# Altium footprint library SamacSys.PcbLib: 1008 footprints (part 15 of 63)
Each footprint in its own frame and in the unit in brackets; x right, y up, seen from the top. Pads: shape width x height; smd on the part's side, far side on the other; paste and mask are expansions set on the pad; w line width, h text height; cw(c..) or ccw(c..) is an arc to the next point about the centre after c.
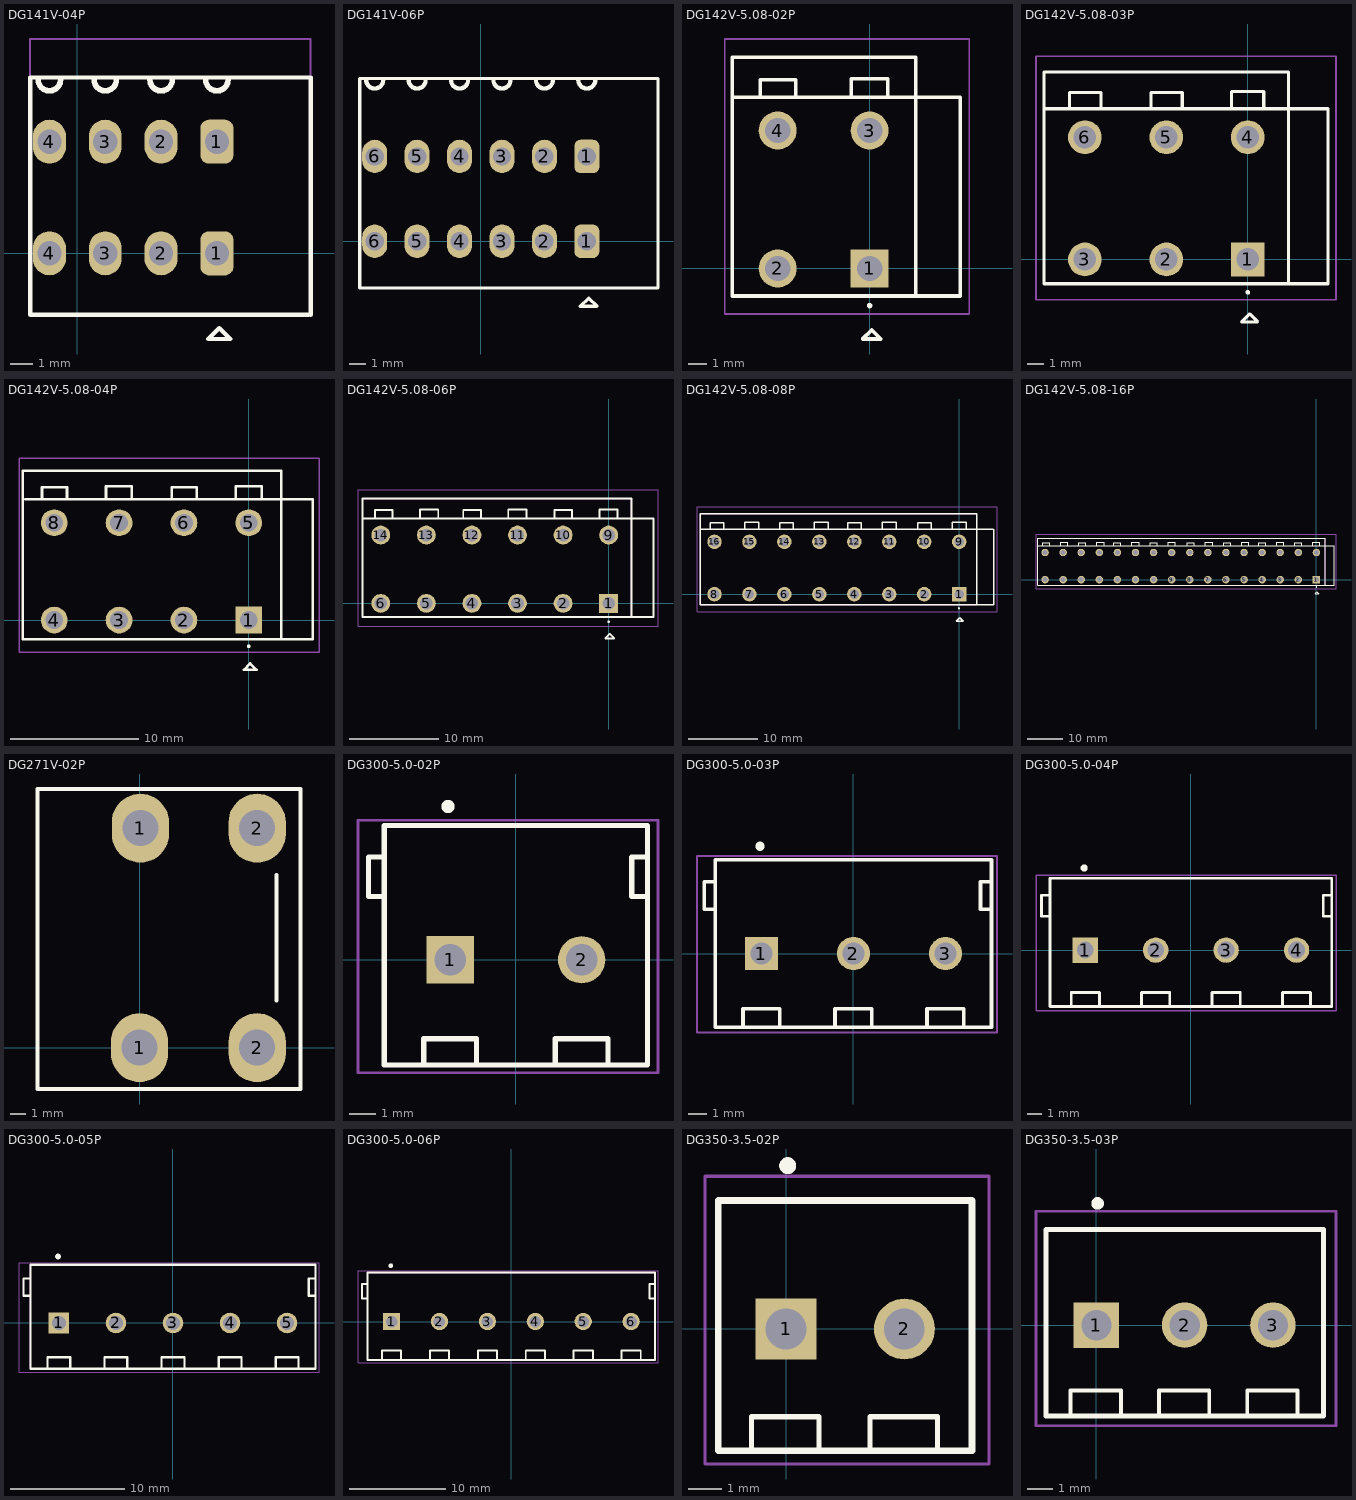
[diagram p14: the footprints below, top view; thin cyan lines are the x and y axes]

## DG141V-04P [mm]
height 14
pads (8):
  rrect50% 1.5x2 hole 1.1: 1(6.35,0) 1(6.35,5.08)
  oval 1.5x2 hole 1.1: 2(3.81,0) 2(3.81,5.08) 3(1.27,0) 3(1.27,5.08) 4(-1.27,0) 4(-1.27,5.08)
Top Overlay:
  lines w0.2: 10.529,-2.8 -2.15,-2.8 -2.15,8 10.61,8 10.61,-2.8 ; 5.96,-3.897 6.96,-3.897 6.46,-3.397 5.96,-3.897
  lines w0.254: -1.778,7.9 ccw(c-1.27,7.9) -0.762,7.9 ; 0.762,7.9 ccw(c1.27,7.9) 1.778,7.9 ; 3.302,7.9 ccw(c3.81,7.9) 4.318,7.9 ; 5.842,7.9 ccw(c6.35,7.9) 6.858,7.9
Countryard:
  lines w0.1: 10.529,-2.8 -2.15,-2.8 -2.15,9.751 10.61,9.751 10.61,-2.8
3D body "DG141V-2.54-04P-1Y-00A(H).stp": height 13.6, standoff -3.5, extent -2.2,-2.8 10.5,9.8

## DG141V-06P [mm]
height 14
pads (12):
  rrect50% 1.5x2 hole 1.1: 1(6.35,0) 1(6.35,5.08)
  oval 1.5x2 hole 1.1: 2(3.81,0) 2(3.81,5.08) 3(1.27,0) 3(1.27,5.08) 4(-1.27,0) 4(-1.27,5.08) 5(-3.81,0) 5(-3.81,5.08) 6(-6.35,0) 6(-6.35,5.08)
Top Overlay:
  lines w0.2: 10.529,-2.8 -7.25,-2.8 -7.25,9.751 10.61,9.751 10.61,-2.8 ; 5.96,-3.897 6.46,-3.397 6.96,-3.897 5.96,-3.897
  lines w0.254: -6.858,9.652 ccw(c-6.35,9.652) -5.842,9.652 ; -4.318,9.652 ccw(c-3.81,9.652) -3.302,9.652 ; -1.778,9.652 ccw(c-1.27,9.652) -0.762,9.652 ; 0.762,9.652 ccw(c1.27,9.652) 1.778,9.652 ; 3.302,9.652 ccw(c3.81,9.652) 4.318,9.652 ; 5.842,9.652 ccw(c6.35,9.652) 6.858,9.652
Countryard:
  lines w0.1: 10.529,-2.8 -7.25,-2.8 -7.25,9.751 10.61,9.751 10.61,-2.8
3D body "DG141V-2.54-06P-1Y-00A(H).stp": height 13.6, standoff -3.5, extent -7.239,-2.744 10.541,9.856

## DG142V-5.08-02P [mm]
pads (4):
  rect 2.1x2.1 hole 1.4: 1(0,0)
  round 2.1 hole 1.4: 2(-5.08,0) 3(0,7.62) 4(-5.08,7.62)
Top Overlay:
  lines w0.2: -7.6,9.455 4.955,9.455 ; -6.04,9.455 -6.04,10.418 -4.082,10.418 -4.082,9.455 ; -1.025,9.482 -1.025,10.475 1,10.475 1,9.464 ; 5,9.455 5,-1.52 2.54,-1.52 ; 0,-2.1 cw(c0,-2.05) 0,-2 ; 0,-2.1 ccw(c0,-2.05) 0,-2 ; 0,-2.1 cw(c0,-2.05) 0,-2 ; 2.54,-1.52 2.54,11.68 -7.6,11.68 -7.6,-1.52 2.54,-1.52 ; -0.39,-3.897 0.11,-3.397 0.61,-3.897 -0.39,-3.897
Assembly:
  lines w0.1: -7.62,-1.52 2.54,-1.52 2.54,11.68 -7.62,11.68 -7.62,-1.52
Countryard:
  lines w0.1: -8,-2.52 -8,12.68 5.5,12.68 5.5,-2.52 -8,-2.52
3D body "DG142V-5.08-02P-1Y-1000A(H).stp": height 14.17, standoff -3.43, extent -7.62,-1.462 5.24,11.938

## DG142V-5.08-03P [mm]
pads (6):
  rect 2.1x2.1 hole 1.4: 1(0,0)
  round 2.1 hole 1.4: 2(-5.08,0) 3(-10.16,0) 4(0,7.62) 5(-5.08,7.62) 6(-10.16,7.62)
Top Overlay:
  lines w0.2: -12.7,9.398 5,9.398 5,-1.52 2.54,-1.52 ; -11.12,9.455 -11.12,10.418 -9.162,10.418 -9.162,9.455 ; -6.04,9.455 -6.04,10.418 -4.082,10.418 -4.082,9.455 ; -1.025,9.482 -1.025,10.475 1,10.475 1,9.464 ; 0,-2.1 cw(c0,-2.05) 0,-2 ; 0,-2.1 ccw(c0,-2.05) 0,-2 ; 0,-2.1 cw(c0,-2.05) 0,-2 ; 2.54,-1.52 -12.7,-1.52 -12.7,11.68 2.54,11.68 2.54,-1.52 ; -0.39,-3.897 0.61,-3.897 0.11,-3.397 -0.39,-3.897
Assembly:
  lines w0.1: -12.7,-1.52 -12.7,11.68 2.54,11.68 2.54,-1.52 -12.7,-1.52
Countryard:
  lines w0.1: -13.208,-2.52 5.5,-2.52 5.5,12.68 -13.208,12.68 -13.208,-2.52
3D body "DG142V-5.08-02P-1Y-1000A(H).stp": height 14.17, standoff -3.43, extent -7.62,-1.462 5.24,11.938
3D body "DG142V-5.08-02P-1Y-1000A(H).stp": height 14.17, standoff -3.43, extent -12.7,-1.462 0.16,11.938

## DG142V-5.08-04P [mm]
pads (8):
  rect 2.1x2.1 hole 1.4: 1(0,0)
  round 2.1 hole 1.4: 2(-5.08,0) 3(-10.16,0) 4(-15.24,0) 5(0,7.62) 6(-5.08,7.62) 7(-10.16,7.62) 8(-15.24,7.62)
Top Overlay:
  lines w0.2: -17.5,9.455 4.955,9.455 ; -16.2,9.455 -16.2,10.418 -14.242,10.418 -14.242,9.455 ; -11.185,9.482 -11.185,10.475 -9.16,10.475 -9.16,9.464 ; -6.04,9.455 -6.04,10.418 -4.082,10.418 -4.082,9.455 ; -1.025,9.482 -1.025,10.475 1,10.475 1,9.464 ; 5,9.455 5,-1.52 2.54,-1.52 ; 0,-2.1 cw(c0,-2.05) 0,-2 ; 0,-2.1 ccw(c0,-2.05) 0,-2 ; 0,-2.1 cw(c0,-2.05) 0,-2 ; 2.54,-1.52 2.54,11.68 -17.7,11.68 -17.7,-1.52 2.54,-1.52 ; -0.39,-3.897 0.11,-3.397 0.61,-3.897 -0.39,-3.897
Assembly:
  lines w0.1: -17.7,-1.52 2.54,-1.52 2.54,11.68 -17.7,11.68 -17.7,-1.52
Countryard:
  lines w0.1: -18,-2.52 -18,12.68 5.5,12.68 5.5,-2.52 -18,-2.52
3D body "DG142V-5.08-04P-1Y-1000A(H).stp": height 14.17, standoff -3.43, extent -17.78,-1.462 5.24,11.938

## DG142V-5.08-06P [mm]
pads (12):
  rect 2.1x2.1 hole 1.4: 1(0,0)
  round 2.1 hole 1.4: 2(-5.08,0) 3(-10.16,0) 4(-15.24,0) 5(-20.32,0) 6(-25.4,0) 9(0,7.62) 10(-5.08,7.62) 11(-10.16,7.62) 12(-15.24,7.62) 13(-20.32,7.62) 14(-25.4,7.62)
Top Overlay:
  lines w0.2: -27.44,9.455 -15.045,9.455 ; -26.04,9.455 -26.04,10.418 -24.082,10.418 -24.082,9.455 ; -21.025,9.482 -21.025,10.475 -19,10.475 -19,9.464 ; -17.5,9.455 4.955,9.455 ; -16.2,9.455 -16.2,10.418 -14.242,10.418 -14.242,9.455 ; -11.185,9.482 -11.185,10.475 -9.16,10.475 -9.16,9.464 ; -6.04,9.455 -6.04,10.418 -4.082,10.418 -4.082,9.455 ; -1.025,9.482 -1.025,10.475 1,10.475 1,9.464 ; 5,9.455 5,-1.52 2.54,-1.52 ; 0,-2.1 cw(c0,-2.05) 0,-2 ; 0,-2.1 ccw(c0,-2.05) 0,-2 ; 0,-2.1 cw(c0,-2.05) 0,-2 ; 2.54,-1.52 -27.44,-1.52 -27.44,11.68 2.54,11.68 2.54,-1.52 ; -0.39,-3.897 0.11,-3.397 0.61,-3.897 -0.39,-3.897
Assembly:
  lines w0.1: -27.44,-1.52 2.54,-1.52 2.54,11.68 -27.44,11.68
Countryard:
  lines w0.1: -27.94,-2.52 -27.94,12.68 5.5,12.68 5.5,-2.52 -27.94,-2.52
3D body "DG142V-5.0-06P-1Y-00A&Z(H).stp": height 14.1, standoff -3.5, extent -27.87,-1.4 4.67,12.1

## DG142V-5.08-08P [mm]
pads (16):
  rect 2.1x2.1 hole 1.4: 1(0,0)
  round 2.1 hole 1.4: 2(-5.08,0) 3(-10.16,0) 4(-15.24,0) 5(-20.32,0) 6(-25.4,0) 7(-30.48,0) 8(-35.56,0) 9(0,7.62) 10(-5.08,7.62) 11(-10.16,7.62) 12(-15.24,7.62) 13(-20.32,7.62) 14(-25.4,7.62) 15(-30.48,7.62) 16(-35.56,7.62)
Top Overlay:
  lines w0.2: -37.5,9.455 -15.045,9.455 ; -36.2,9.455 -36.2,10.418 -34.242,10.418 -34.242,9.455 ; -31.185,9.482 -31.185,10.475 -29.16,10.475 -29.16,9.464 ; -26.04,9.455 -26.04,10.418 -24.082,10.418 -24.082,9.455 ; -21.025,9.482 -21.025,10.475 -19,10.475 -19,9.464 ; -17.5,9.455 4.955,9.455 ; -16.2,9.455 -16.2,10.418 -14.242,10.418 -14.242,9.455 ; -11.185,9.482 -11.185,10.475 -9.16,10.475 -9.16,9.464 ; -6.04,9.455 -6.04,10.418 -4.082,10.418 -4.082,9.455 ; -1.025,9.482 -1.025,10.475 1,10.475 1,9.464 ; 5,9.455 5,-1.52 2.54,-1.52 ; 0,-2.1 cw(c0,-2.05) 0,-2 ; 0,-2.1 ccw(c0,-2.05) 0,-2 ; 0,-2.1 cw(c0,-2.05) 0,-2 ; 2.54,-1.52 2.54,11.68 -37.6,11.68 -37.6,-1.52 2.54,-1.52 ; -0.39,-3.897 0.11,-3.397 0.61,-3.897 -0.39,-3.897
Assembly:
  lines w0.1: -37.6,-1.52 2.54,-1.52 2.54,11.68 -37.6,11.68 -37.6,-1.52
Countryard:
  lines w0.1: -38.1,-2.52 5.5,-2.52 5.5,12.68 -38.1,12.68 -38.1,-2.52
3D body "DG142V-5.08-08P-1Y-1000A(H).stp": height 14.17, standoff -3.43, extent -38.1,-1.335 5.24,12.065

## DG142V-5.08-16P [mm]
pads (32):
  rect 2.1x2.1 hole 1.4: 1(0,0)
  round 2.1 hole 1.4: 2(-5.08,0) 3(-10.16,0) 4(-15.24,0) 5(-20.32,0) 6(-25.4,0) 7(-30.48,0) 8(-35.56,0) 9(-40.64,0) 10(-45.72,0) 11(-50.8,0) 12(-55.88,0) 13(-60.96,0) 14(-66.04,0) 15(-71.12,0) 16(-76.2,0) 17(0,7.62)
  round 2.1 hole 1.4 unplated: 18(-5.08,7.62) 19(-10.16,7.62) 20(-15.24,7.62) 21(-20.32,7.62) 22(-25.4,7.62) 23(-30.48,7.62) 24(-35.56,7.62) 25(-40.64,7.62) 26(-45.72,7.62) 27(-50.8,7.62) 28(-55.88,7.62) 29(-60.96,7.62) 30(-66.04,7.62) 31(-71.12,7.62) 32(-76.2,7.62)
Top Overlay:
  lines w0.2: -78.24,9.455 -15.045,9.455 ; -78.14,9.455 -55.685,9.455 ; -76.84,9.455 -76.84,10.418 -74.882,10.418 -74.882,9.455 ; -71.825,9.482 -71.825,10.475 -69.8,10.475 -69.8,9.464 ; -66.68,9.455 -66.68,10.418 -64.722,10.418 -64.722,9.455 ; -61.665,9.482 -61.665,10.475 -59.64,10.475 -59.64,9.464 ; -56.84,9.455 -56.84,10.418 -54.882,10.418 -54.882,9.455 ; -51.825,9.482 -51.825,10.475 -49.8,10.475 -49.8,9.464 ; -46.68,9.455 -46.68,10.418 -44.722,10.418 -44.722,9.455 ; -41.665,9.482 -41.665,10.475 -39.64,10.475 -39.64,9.464 ; -36.2,9.455 -36.2,10.418 -34.242,10.418 -34.242,9.455 ; -31.185,9.482 -31.185,10.475 -29.16,10.475 -29.16,9.464 ; -26.04,9.455 -26.04,10.418 -24.082,10.418 -24.082,9.455 ; -21.025,9.482 -21.025,10.475 -19,10.475 -19,9.464 ; -17.5,9.455 4.955,9.455 ; -16.2,9.455 -16.2,10.418 -14.242,10.418 -14.242,9.455 ; -11.185,9.482 -11.185,10.475 -9.16,10.475 -9.16,9.464 ; -6.04,9.455 -6.04,10.418 -4.082,10.418 -4.082,9.455 ; -1.025,9.482 -1.025,10.475 1,10.475 1,9.464 ; 5,9.455 5,-1.52 2.54,-1.52 ; 0,-2.1 cw(c0,-2.05) 0,-2 ; 0,-2.1 ccw(c0,-2.05) 0,-2 ; 0,-2.1 cw(c0,-2.05) 0,-2 ; 2.54,-1.52 2.54,11.68 -78.24,11.68 -78.24,-1.52 2.54,-1.52 ; -0.39,-3.897 0.61,-3.897 0.11,-3.397 -0.39,-3.897
Assembly:
  lines w0.1: -78.24,-1.52 -78.24,11.68 2.54,11.68 2.54,-1.52 -78.24,-1.52
Countryard:
  lines w0.1: -78.74,-2.52 -78.74,12.68 5.5,12.68 5.5,-2.52 -78.74,-2.52
3D body "DG142V-5.08-16P-1Y-1000A(H).stp": height 14.17, standoff -3.43, extent -78.74,-1.335 5.24,12.065

## DG271V-02P [mm]
pads (4):
  oval 3.65x4.4 hole 2.3: 1(0,0) 1(0.05,14) 2(7.5,0) 2(7.5,14)
Top Overlay:
  lines w0.254: 8.718,3 8.718,11 ; -6.5,-2.635 10.25,-2.635 10.25,16.5 -6.5,16.5 -6.5,-2.635
3D body "DG271V-7.5-02P-1Y-100A.STP": height 24.3, standoff -4.45, extent -6.663,-2.106 10.137,16.394

## DG300-5.0-02P [mm]
pads (2):
  rect 1.8x1.8 hole 1.2: 1(-2.5,0)
  round 1.8 hole 1.2: 2(2.5,0)
Top Overlay:
  lines w0.2: -5,2.4 -5.6,2.4 -5.6,3.9 -5,3.9 ; -3.5,-4 -3.5,-3 -1.5,-3 -1.5,-4 ; 1.5,-4 1.5,-3 3.5,-3 3.5,-4 ; 5,2.4 4.4,2.4 4.4,3.9 5,3.9 ; -5,-4 5,-4 5,5.1 -5,5.1 -5,-4
  lines w0.4: -2.627,5.826 cw(c-2.577,5.826) -2.527,5.826 cw(c-2.577,5.826) -2.627,5.826
Assembly:
  lines w0.1: -5,-4 5,-4 5,5.1 -5,5.1 -5,-4
Countryard:
  lines w0.1: -6,-4.3 5.4,-4.3 5.4,5.3 -6,5.3 -6,-4.3
3D body "DG300-5.0-02P-1Y-00A(H).stp": height 12.61, standoff -4.39, extent -5.6,-3.9 5,5.1

## DG300-5.0-03P [mm]
pads (3):
  rect 1.8x1.8 hole 1.2: 1(-5,0)
  round 1.8 hole 1.2: 2(0,0) 3(5,0)
Top Overlay:
  lines w0.2: -7.5,2.4 -8.1,2.4 -8.1,3.9 -7.5,3.9 ; -6,-4 -6,-3 -4,-3 -4,-4 ; -1,-4 -1,-3 1,-3 1,-4 ; 7.5,2.4 6.9,2.4 6.9,3.9 7.5,3.9 ; 4,-3 6,-3 ; 4,-3 4,-4 4,-3 ; 4,-3 6,-3 ; 6,-3 6,-4 6,-3 ; -7.5,-4 7.5,-4 7.5,5.1 -7.5,5.1 -7.5,-4
  lines w0.4: -5.127,5.826 cw(c-5.077,5.826) -5.027,5.826 cw(c-5.077,5.826) -5.127,5.826
Assembly:
  lines w0.1: -7.5,-4 7.5,-4 7.5,5.1 -7.5,5.1 -7.5,-4
Countryard:
  lines w0.1: -8.5,-4.3 7.8,-4.3 7.8,5.3 -8.5,5.3 -8.5,-4.3
3D body "DG300-5.0-03P-1Y-00A(H).stp": height 12.61, standoff -4.39, extent -8.1,-4 7.5,5

## DG300-5.0-04P [mm]
pads (4):
  rect 1.8x1.8 hole 1.2: 1(-7.5,0)
  round 1.8 hole 1.2: 2(-2.5,0) 3(2.5,0)
  round 1.8 hole 1.2 unplated: 4(7.5,0)
Top Overlay:
  lines w0.2: -10,2.4 -10.6,2.4 -10.6,3.9 -10,3.9 ; -8.5,-4 -8.5,-3 -6.5,-3 -6.5,-4 ; -3.5,-4 -3.5,-3 -1.5,-3 -1.5,-4 ; 1.5,-4 1.5,-3 3.5,-3 3.5,-4 ; 6.5,-4 6.5,-3 8.5,-3 8.5,-4 ; 10,2.4 9.4,2.4 9.4,3.9 10,3.9 ; -10,-4 10,-4 10,5.1 -10,5.1 -10,-4
  lines w0.4: -7.627,5.826 cw(c-7.577,5.826) -7.527,5.826 cw(c-7.577,5.826) -7.627,5.826
Assembly:
  lines w0.1: -10,-4 10,-4 10,5.1 -10,5.1 -10,-4
Countryard:
  lines w0.1: -11,-4.3 10.3,-4.3 10.3,5.3 -11,5.3 -11,-4.3
3D body "DG300-5.0-04P-1Y-00A(H).stp": height 12.61, standoff -4.39, extent -10.6,-3.9 10,5.1

## DG300-5.0-05P [mm]
pads (5):
  rect 1.8x1.8 hole 1.2: 1(-10,0)
  round 1.8 hole 1.2: 2(-5,0) 3(0,0) 4(5,0) 5(10,0)
Top Overlay:
  lines w0.2: -12.5,2.4 -13.1,2.4 -13.1,3.9 -12.5,3.9 ; -11,-4 -11,-3 -9,-3 -9,-4 ; -6,-4 -6,-3 -4,-3 -4,-4 ; -1,-4 -1,-3 1,-3 1,-4 ; 4,-4 4,-3 6,-3 6,-4 ; 9,-4 9,-3 11,-3 11,-4 ; 12.5,2.4 11.9,2.4 11.9,3.9 12.5,3.9 ; -12.5,-4 12.5,-4 12.5,5.1 -12.5,5.1 -12.5,-4
  lines w0.4: -10.127,5.826 cw(c-10.077,5.826) -10.027,5.826 cw(c-10.077,5.826) -10.127,5.826
Assembly:
  lines w0.1: 7.5,-4 -12.5,-4 -12.5,5.1 7.5,5.1 ; 12.5,-4 12.5,5.1
Countryard:
  lines w0.1: -13.5,-4.3 12.8,-4.3 12.8,5.3 -13.5,5.3 -13.5,-4.3
3D body "DG300-5.0-05P-1Y-00A(H).stp": height 12.61, standoff -4.39, extent -13.1,-4 12.5,5

## DG300-5.0-06P [mm]
pads (6):
  rect 1.8x1.8 hole 1.2: 1(-12.5,0)
  round 1.8 hole 1.2: 2(-7.5,0) 3(-2.5,0)
  round 1.8 hole 1.2 unplated: 4(2.5,0) 5(7.5,0) 6(12.5,0)
Top Overlay:
  lines w0.2: -15,2.4 -15.6,2.4 -15.6,3.9 -15,3.9 ; -13.5,-4 -13.5,-3 -11.5,-3 -11.5,-4 ; -8.5,-4 -8.5,-3 -6.5,-3 -6.5,-4 ; -3.5,-4 -3.5,-3 -1.5,-3 -1.5,-4 ; 1.5,-4 1.5,-3 3.5,-3 3.5,-4 ; 6.5,-4 6.5,-3 8.5,-3 8.5,-4 ; 11.5,-4 11.5,-3 13.5,-3 13.5,-4 ; 15,2.4 14.4,2.4 14.4,3.9 15,3.9 ; -15,-4 -15,5.1 15,5.1 15,-4 -15,-4
  lines w0.4: -12.627,5.826 ccw(c-12.577,5.826) -12.527,5.826 ccw(c-12.577,5.826) -12.627,5.826
Assembly:
  lines w0.1: -15,-4 -15,5.1 15,5.1 15,-4 -15,-4
Countryard:
  lines w0.1: -16,-4.3 -16,5.3 15.3,5.3 15.3,-4.3 -16,-4.3
3D body "DG300-5.0-06P-1Y-00A(H).stp": height 12.61, standoff -4.39, extent -15.6,-4 15,5

## DG350-3.5-02P [mm]
pads (2):
  rect 1.8x1.8 hole 1.2: 1(0,0)
  round 1.8 hole 1.2: 2(3.5,0)
Top Overlay:
  lines w0.15: -1.022,-3.594 -1.022,-2.594 0.978,-2.594 0.978,-3.594 ; 2.478,-3.594 2.478,-2.594 4.478,-2.594 4.478,-3.594
  lines w0.2: -2,-3.6 -2,3.8 5.5,3.8 5.5,-3.6 -2,-3.6
  lines w0.4: 0,4.826 ccw(c0.05,4.826) 0.1,4.826 ccw(c0.05,4.826) 0,4.826
Assembly:
  lines w0.1: -2,-3.6 -2,3.8 5.5,3.8 5.5,-3.6 -2,-3.6
Countryard:
  lines w0.1: -2.395,-3.991 -2.395,4.518 6,4.518 6,-3.991 -2.395,-3.991
3D body "DG380-3.5-02P-14-00A&Z(H).stp": height 10.51, standoff -3.49, extent -2,-3.6 5.5,3.8

## DG350-3.5-03P [mm]
pads (3):
  rect 1.8x1.8 hole 1.2: 1(0,0)
  round 1.8 hole 1.2: 2(3.5,0) 3(7,0)
Top Overlay:
  lines w0.15: -1.022,-3.594 -1.022,-2.594 0.978,-2.594 0.978,-3.594 ; 2.478,-3.594 2.478,-2.594 4.478,-2.594 4.478,-3.594 ; 5.978,-3.594 5.978,-2.594 7.978,-2.594 7.978,-3.594
  lines w0.2: -2,-3.6 9,-3.6 9,3.8 -2,3.8 -2,-3.6
  lines w0.4: 0,4.826 cw(c0.05,4.826) 0.1,4.826 cw(c0.05,4.826) 0,4.826
Assembly:
  lines w0.1: -2,-3.6 9,-3.6 9,3.8 -2,3.8 -2,-3.6
Countryard:
  lines w0.1: -2.395,-3.991 9.5,-3.991 9.5,4.518 -2.395,4.518 -2.395,-3.991
3D body "DG380-3.5-03P-14-00A&Z(H).stp": height 10.51, standoff -3.49, extent -2,-3.6 9,3.8